# Altium footprint library 1k trimmer tempory.PcbLib: 1 footprints
Each footprint in its own frame and in the unit in brackets; x right, y up, seen from the top. Pads: shape width x height; smd on the part's side, far side on the other; paste and mask are expansions set on the pad; w line width, h text height; cw(c..) or ccw(c..) is an arc to the next point about the centre after c.
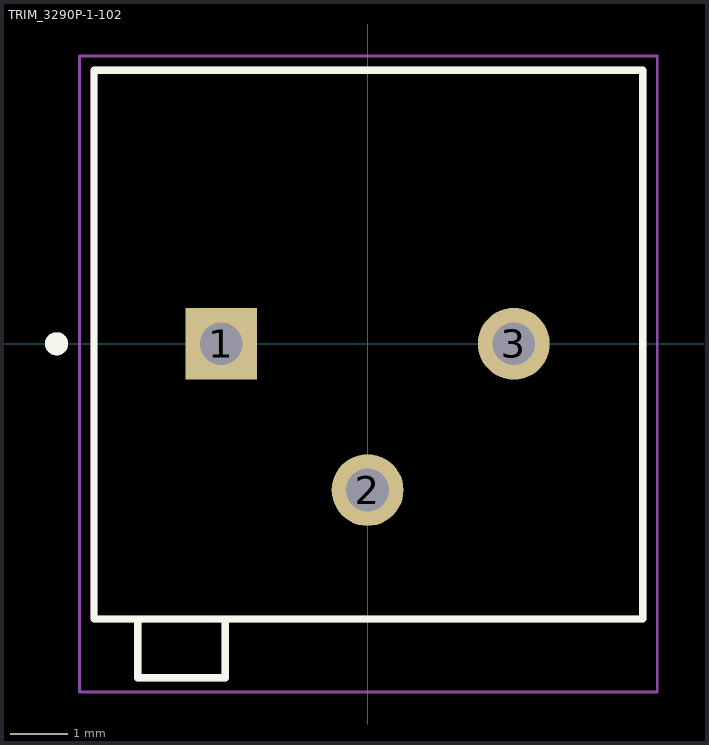
[diagram p0: the footprint, top view; thin cyan lines are the x and y axes]

## TRIM_3290P-1-102 [mm]
pads (3):
  rect 1.248x1.248 / inner round 1.248 / far side rect 1.248x1.248 hole 0.74: 1(-2.54,0)
  round 1.248 hole 0.74: 2(0,-2.54) 3(2.54,0)
Top Overlay:
  circle w0.2: c-5.4,0 r0.1
  lines w0.127: -3.99,-4.78 -3.99,-5.8 -2.47,-5.8 -2.47,-4.78 ; -3.99,-4.78 -4.75,-4.78 -4.75,4.75 4.78,4.75 4.78,-4.78 -2.47,-4.78 ; -3.99,-4.78 -2.47,-4.78
Assembly Top:
  circle w0.2: c-5.4,0 r0.1
  lines w0.127: -3.99,-4.78 -3.99,-5.8 -2.47,-5.8 -2.47,-4.78 ; -3.99,-4.78 -4.75,-4.78 -4.75,4.75 4.78,4.75 4.78,-4.78 -2.47,-4.78 ; -3.99,-4.78 -2.47,-4.78
Courtyard Top:
  lines w0.05: -5,-6.05 5.03,-6.05 5.03,5 -5,5 -5,-6.05
3D body "step_temp.STEP": height 3.81, standoff -8.38, extent -4.75,-5.8 4.78,4.75